# Altium schematic symbol library CONN,Tag-Connect,TC2050.SchLib: 1 symbol
Pins are listed as number, name and electrical type; pins without a type are passive.

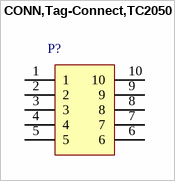
[diagram p0: symbol CONN,Tag-Connect,TC2050]

## CONN,Tag-Connect,TC2050
designator P?  (no BOM)
pins: 1, 2, 3, 4, 5, 6, 7, 8, 9, 10